# Altium schematic symbol library CW341_KintexUltraScaleTarget.SCHLIB: 30 symbols (part 2 of 2)
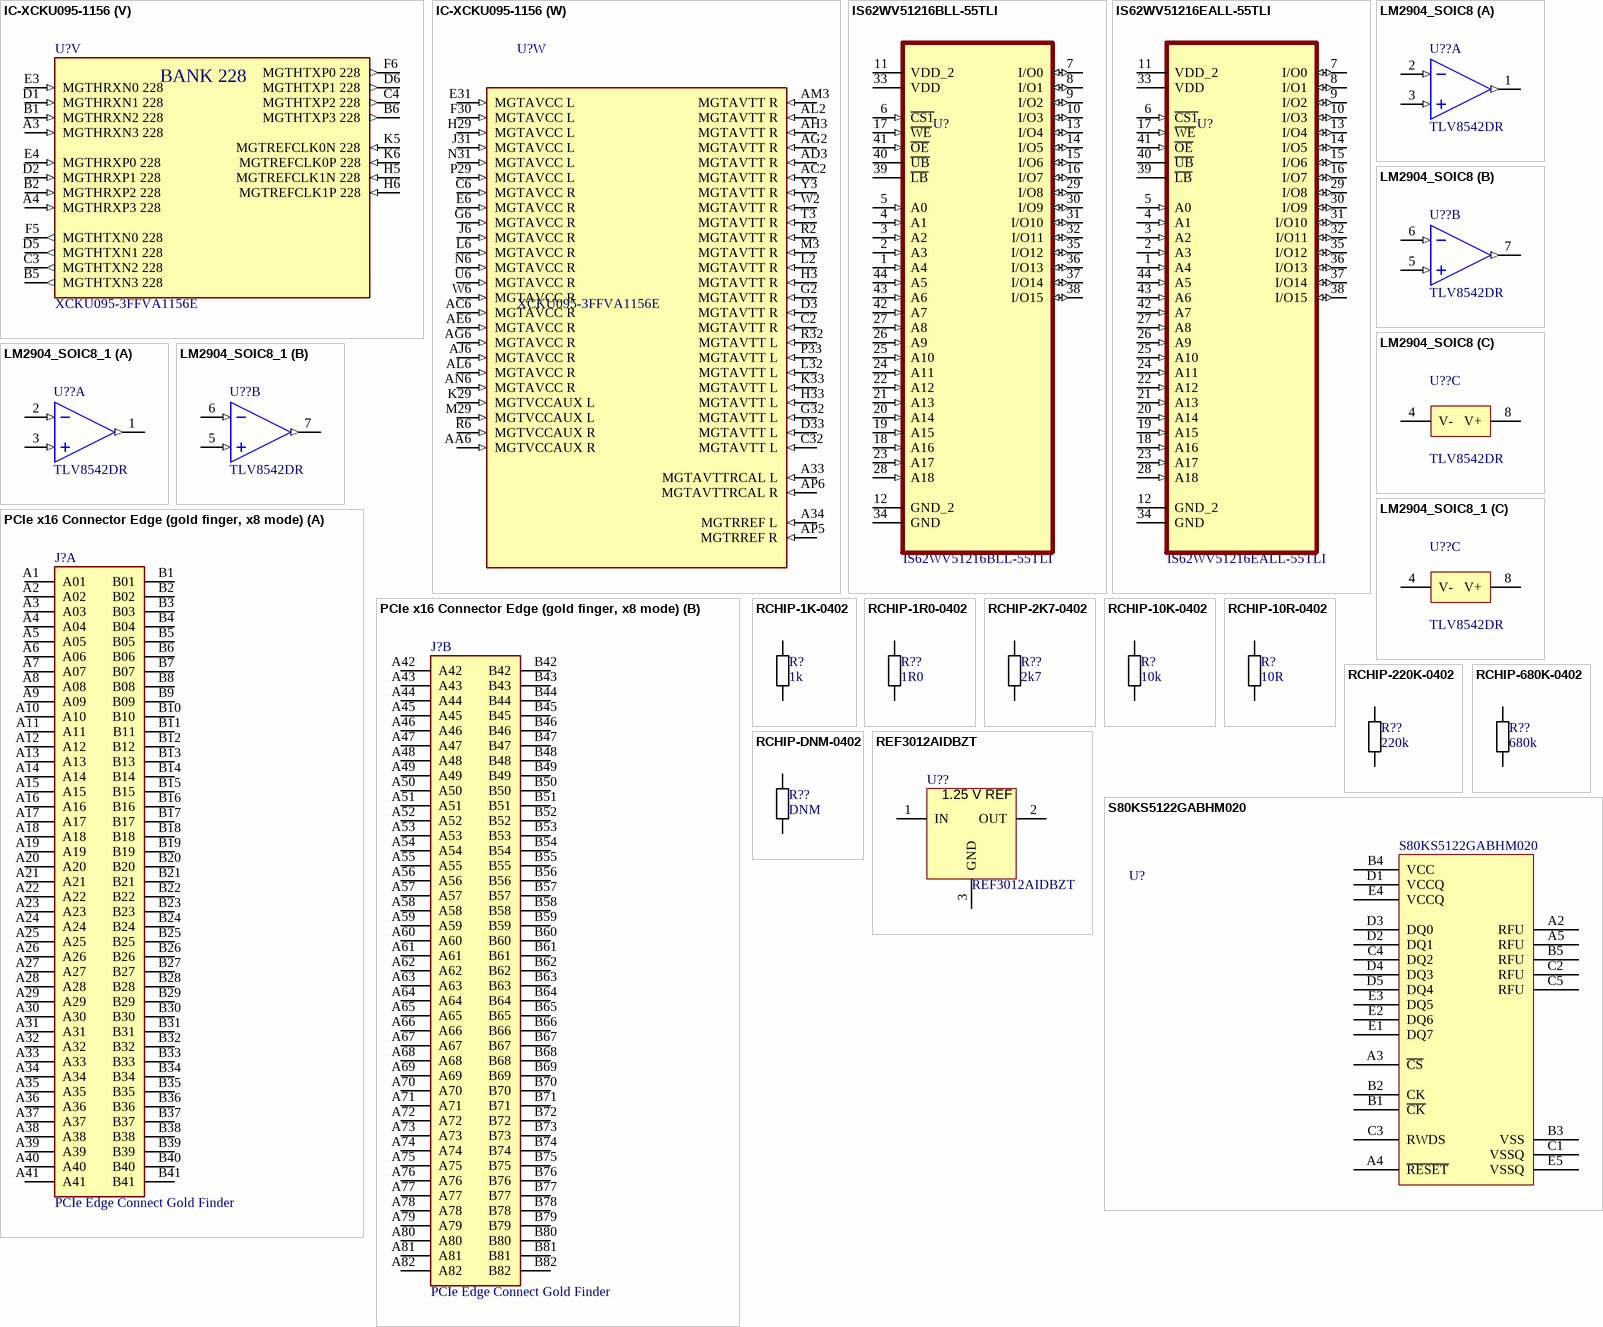
[diagram p13: symbols IC-XCKU095-1156 to S80KS5122GABHM020]

## IC-XCKU095-1156
designator U?, comment XCKU095-3FFVA1156E
IC FPGA 520 I/O 1156FCBGA; Manufacturer: Xilinx; Manufacturer Part Number: XCKU060-3FFVA1156E; Standoff Height: 0.4mm; Ram Size: 38MBytes; Min Supply Voltage: 0.97V; Max Junction Temp: +100°C; Max Supply Voltage: 1.8V; Number Of Logic Elements Cells: 1176000; Number Of I/Os: 520; Speed Grade: 3; Memory Type: RAM; Ipc Land Pattern Name: BGA1156N100P34X34_3500X3500X342; RoHS: TRUE; Height: 3.51mm; Footprint Url: https://www.xilinx.com/support/documentation/user_guides/ug575-ultrascale-pkg-pinout.pdf; Device Class L2: Embedded Processors and Controllers; ComponentLink2URL: https://www.xilinx.com/support/documentation/data_sheets/ds890-ultrascale-overview.pdf; Temperature Range High: +100°C; Device Class L1: Integrated Circuits (ICs); Package: 0; Octopart: https://octopart.com/xcku035-3ffva1156e-xilinx-67038192?r=sp; Automotive: No; ComponentLink2Description: Datasheet; Device Class L3: FPGAs - Field Programmable Gate Arrays; Category: IC; Lead Free: Yes; Temperature: 0°C to +100°C; Temperature Range Low: 0°C; Digikey Description: IC FPGA 520 I/O 1156FCBGA
footprint FP-XCKU060-3FFVA1156E-MFG
footprint FP-XCKU060-3FFVA1156E-IPC_C
footprint FP-XCKU060-3FFVA1156E-IPC_B
footprint FP-XCKU060-3FFVA1156E-IPC_A
part A pins: A1 GND (power), A2 GND (power), A5 GND (power), A6 GND (power), A7 GND (power), A11 GND (power), A21 GND (power), A30 GND (power), A31 GND (power), A32 GND (power), B3 GND (power), B4 GND (power), B7 GND (power), B8 GND (power), B18 GND (power), B28 GND (power), B30 GND (power), B33 GND (power), B34 GND (power), C1 GND (power), C5 GND (power), C7 GND (power), C15 GND (power), C25 GND (power), C30 GND (power), C31 GND (power), D4 GND (power), D7 GND (power), D12 GND (power), D22 GND (power), D30 GND (power), D34 GND (power), E1 GND (power), E2 GND (power), E5 GND (power), E7 GND (power), E9 GND (power), E19 GND (power), E29 GND (power), E30 GND (power), E32 GND (power), F3 GND (power), F4 GND (power), F7 GND (power), F16 GND (power), F26 GND (power), F28 GND (power), F29 GND (power), F33 GND (power), F34 GND (power), G1 GND (power), G5 GND (power), G7 GND (power), G13 GND (power), G23 GND (power), G28 GND (power), G31 GND (power), H4 GND (power), H7 GND (power), H10 GND (power), H20 GND (power), H28 GND (power), H30 GND (power), H34 GND (power), J1 GND (power), J2 GND (power), J5 GND (power), J7 GND (power), J17 GND (power), J27 GND (power), J28 GND (power), J32 GND (power), K3 GND (power), K4 GND (power), K14 GND (power), K24 GND (power), K28 GND (power), K30 GND (power), K34 GND (power), L1 GND (power), L5 GND (power), L11 GND (power), L21 GND (power), L28 GND (power), L31 GND (power), M4 GND (power), M8 GND (power), M10 GND (power), M12 GND (power), M14 GND (power), M16 GND (power), M18 GND (power), M28 GND (power), M30 GND (power), M33 GND (power), M34 GND (power), N1 GND (power), N2 GND (power), N5 GND (power), U11 GNDADC (power)
part B pins: AA1 GND (power), AA2 GND (power), AA5 GND (power), AA11 GND (power), AA13 GND (power), AA15 GND (power), AA17 GND (power), AA19 GND (power), AA21 GND (power), AA31 GND (power), AB3 GND (power), AB4 GND (power), AB8 GND (power), AB10 GND (power), AB12 GND (power), AB14 GND (power), AB16 GND (power), AB18 GND (power), AB28 GND (power), N9 GND (power), N11 GND (power), N13 GND (power), N15 GND (power), N17 GND (power), N19 GND (power), N25 GND (power), N28 GND (power), N32 GND (power), P3 GND (power), P4 GND (power), P8 GND (power), P10 GND (power), P12 GND (power), P14 GND (power), P16 GND (power), P18 GND (power), P22 GND (power), P28 GND (power), P30 GND (power), P34 GND (power), R1 GND (power), R5 GND (power), R9 GND (power), R11 GND (power), R13 GND (power), R15 GND (power), R17 GND (power), R19 GND (power), R28 GND (power), R31 GND (power), T4 GND (power), T8 GND (power), T10 GND (power), T12 GND (power), T14 GND (power), T16 GND (power), T18 GND (power), T20 GND (power), T26 GND (power), T28 GND (power), T29 GND (power), T30 GND (power), T33 GND (power), T34 GND (power), U1 GND (power), U2 GND (power), U5 GND (power), U13 GND (power), U15 GND (power), U17 GND (power), U19 GND (power), U23 GND (power), U30 GND (power), U31 GND (power), U32 GND (power), U33 GND (power), V3 GND (power), V4 GND (power), V10 GND (power), V14 GND (power), V16 GND (power), V18 GND (power), V20 GND (power), V30 GND (power), W1 GND (power), W5 GND (power), W13 GND (power), W15 GND (power), W17 GND (power), W19 GND (power), W27 GND (power), Y4 GND (power), Y8 GND (power), Y10 GND (power), Y14 GND (power), Y16 GND (power), Y18 GND (power), Y20 GND (power), Y24 GND (power), Y34 GND (power)
part C pins: AC1 GND (power), AC5 GND (power), AC11 GND (power), AC13 GND (power), AC15 GND (power), AC17 GND (power), AC19 GND (power), AC25 GND (power), AD4 GND (power), AD12 GND (power), AD22 GND (power), AD32 GND (power), AE1 GND (power), AE2 GND (power), AE5 GND (power), AE7 GND (power), AE9 GND (power), AE19 GND (power), AE29 GND (power), AF3 GND (power), AF4 GND (power), AF7 GND (power), AF16 GND (power), AF26 GND (power), AG1 GND (power), AG5 GND (power), AG7 GND (power), AG13 GND (power), AG23 GND (power), AG33 GND (power), AH4 GND (power), AH7 GND (power), AH10 GND (power), AH20 GND (power), AH30 GND (power), AJ1 GND (power), AJ2 GND (power), AJ5 GND (power), AJ7 GND (power), AJ17 GND (power), AJ27 GND (power), AK3 GND (power), AK4 GND (power), AK7 GND (power), AK14 GND (power), AK24 GND (power), AK34 GND (power), AL1 GND (power), AL5 GND (power), AL7 GND (power), AL11 GND (power), AL21 GND (power), AL31 GND (power), AM4 GND (power), AM7 GND (power), AM8 GND (power), AM18 GND (power), AM28 GND (power), AN1 GND (power), AN2 GND (power), AN5 GND (power), AN7 GND (power), AN15 GND (power), AN25 GND (power), AP3 GND (power), AP4 GND (power), AP7 GND (power), AP12 GND (power), AP22 GND (power), AP32 GND (power), V8 GND (power)
part D pins: AA7 D02 0 (io), AA9 CCLK 0 (io), AB7 D01 DIN 0 (io), AC7 D00 MOSI 0 (io), AC9 TCK 0 (in), K7 M0 0 (in), L7 M1 0 (in), M7 M2 0 (in), N7 DONE 0 (io), P7 POR OVERRIDE (in), R7 PUDC B 0 (in), T7 PROGRAM B 0 (in), U7 RDWR FCS B 0 (io), U9 TDO 0 (out), V7 INIT B 0 (in), V9 TDI 0 (in), W7 CFGBVS 0 (in), W9 TMS 0 (in), Y7 D03 0 (io), Y11 DXN (power), Y12 DXP (power)
part E pins: AA8 VCCAUX (power), AA10 VCCINT (power), AA12 VCCINT (power), AA14 VCCINT (power), AA16 VCCINT (power), AA18 VCCBRAM (power), AB9 VCCO 0 (power), AB11 VCCINT (power), AB13 VCCINT (power), AB15 VCCINT (power), AB17 VCCBRAM (power), AB19 VCCAUX IO (power), AC8 VCCAUX (power), AC10 VCCINT (power), AC12 VCCINT (power), AC14 VCCINT (power), AC16 VCCINT (power), AC18 VCCAUX IO (power), AD7 VBATT (power), M9 VCCINT (power), M11 VCCINT (power), M13 VCCINT (power), M15 VCCINT (power), M17 VCCINT IO (power), M19 VCCAUX IO (power), N8 VCCINT (power), N10 VCCINT (power), N12 VCCINT (power), N14 VCCINT (power), N16 VCCINT (power), N18 VCCAUX IO (power), P9 VCCINT (power), P11 VCCINT (power), P13 VCCINT (power), P15 VCCINT (power), P17 VCCINT IO (power), P19 VCCAUX IO (power), R8 VCCINT (power), R10 VCCINT (power), R12 VCCINT (power), R14 VCCINT (power), R16 VCCINT (power), R18 VCCINT IO (power), R20 VCCAUX IO (power), T9 VCCINT (power), T11 VCCINT (power), T13 VCCINT (power), T15 VCCINT (power), T17 VCCINT (power), T19 VCCAUX IO (power), U8 VCCAUX (power), U10 VCCINT (power), U12 VCCADC (power), U14 VCCINT (power), U16 VCCINT (power), U18 VCCINT IO (power), U20 VCCAUX IO (power), V11 VREFN (power), V12 VP (power), V13 VCCINT (power), V15 VCCINT (power), V17 VCCBRAM (power), V19 VCCAUX IO (power), W8 VCCAUX (power), W10 VCCINT (power), W11 VN (power), W12 VREFP (power), W14 VCCINT (power), W16 VCCINT (power), W18 VCCINT IO (power), W20 VCCAUX IO (power), Y9 VCCO 0 (power), Y13 VCCINT (power), Y15 VCCINT (power), Y17 VCCBRAM (power), Y19 VCCAUX IO (power)
part F pins: AD20 IO L3P T0L N4 AD15P 45 (io), AD21 IO L1P T0L N0 DBC 45 (io), AD23 VREF 45 (io), AD24 IO T0U N12 VRP 45 (io), AE20 IO L3N T0L N5 AD15N 45 (io), AE21 IO L1N T0L N1 DBC 45 (io), AE22 IO L5P T0U N8 AD14P 45 (io), AE23 IO L5N T0U N9 AD14N 45 (io), AE24 VCCO 45 (power), AE25 IO L7P T1L N0 QBC AD13P 45 (io), AE26 IO L7N T1L N1 QBC AD13N 45 (io), AF20 IO L2P T0L N2 45 (io), AF21 VCCO 45 (power), AF22 IO L6P T0U N10 AD6P 45 (io), AF23 IO L8P T1L N2 AD5P 45 (io), AF24 IO L8N T1L N3 AD5N 45 (io), AF25 IO T1U N12 45 (io), AG20 IO L2N T0L N3 45 (io), AG21 IO L4P T0U N6 DBC AD7P 45 (io), AG22 IO L6N T0U N11 AD6N 45 (io), AG24 IO L9P T1L N4 AD12P 45 (io), AG25 IO L9N T1L N5 AD12N 45 (io), AH21 IO L4N T0U N7 DBC AD7N 45 (io), AH22 IO L12P T1U N10 GC 45 (io), AH23 IO L12N T1U N11 GC 45 (io), AH24 IO L10P T1U N6 QBC AD4P 45 (io), AH25 VCCO 45 (power), AJ20 IO L16P T2U N6 QBC AD3P 45 (io), AJ21 IO L13P T2L N0 GC QBC 45 (io), AJ22 VCCO 45 (power), AJ23 IO L11P T1U N8 GC 45 (io), AJ24 IO L11N T1U N9 GC 45 (io), AJ25 IO L10N T1U N7 QBC AD4N 45 (io), AK20 IO L16N T2U N7 QBC AD3N 45 (io), AK21 IO L13N T2L N1 GC QBC 45 (io), AK22 IO L14P T2L N2 GC 45 (io), AK23 IO L14N T2L N3 GC 45 (io), AK25 IO T2U N12 45 (io), AL20 IO L15P T2L N4 AD11P 45 (io), AL22 IO L17P T2U N8 AD10P 45 (io), AL23 IO L17N T2U N9 AD10N 45 (io), AL24 IO L18P T2U N10 AD2P 45 (io), AL25 IO L18N T2U N11 AD2N 45 (io), AM20 IO L15N T2L N5 AD11N 45 (io), AM21 IO L19P T3L N0 DBC AD9P 45 (io), AM22 IO L20P T3L N2 AD1P 45 (io), AM23 VCCO 45 (power), AM24 IO L21P T3L N4 AD8P 45 (io), AM25 IO T3U N12 45 (io), AN20 VCCO 45 (power), AN21 IO L19N T3L N1 DBC AD9N 45 (io), AN22 IO L20N T3L N3 AD1N 45 (io), AN23 IO L24P T3U N10 45 (io), AN24 IO L21N T3L N5 AD8N 45 (io), AP20 IO L22P T3U N6 DBC AD0P 45 (io), AP21 IO L22N T3U N7 DBC AD0N 45 (io), AP23 IO L24N T3U N11 45 (io), AP24 IO L23P T3U N8 45 (io), AP25 IO L23N T3U N9 45 (io)
part G pins: AD14 IO T3U N12 44 (io), AD15 IO L24N T3U N11 44 (io), AD16 IO L24P T3U N10 44 (io), AD17 VCCO 44 (power), AD18 IO L19N T3L N1 DBC AD9N 44 (io), AD19 IO L19P T3L N0 DBC AD9P 44 (io), AE14 VCCO 44 (power), AE15 IO L22N T3U N7 DBC AD0N 44 (io), AE16 IO L22P T3U N6 DBC AD0P 44 (io), AE17 IO L23P T3U N8 44 (io), AE18 IO L21P T3L N4 AD8P 44 (io), AF14 IO L20N T3L N3 AD1N 44 (io), AF15 IO L20P T3L N2 AD1P 44 (io), AF17 IO L23N T3U N9 44 (io), AF18 IO L21N T3L N5 AD8N 44 (io), AF19 VREF 45 (io), AG14 IO L18N T2U N11 AD2N 44 (io), AG15 IO L18P T2U N10 AD2P 44 (io), AG16 IO L15N T2L N5 AD11N 44 (io), AG17 IO L15P T2L N4 AD11P 44 (io), AG18 VCCO 44 (power), AG19 IO L17P T2U N8 AD10P 44 (io), AH14 IO T2U N12 44 (io), AH15 VCCO 44 (power), AH16 IO L14P T2L N2 GC 44 (io), AH17 IO L13N T2L N1 GC QBC 44 (io), AH18 IO L13P T2L N0 GC QBC 44 (io), AH19 IO L17N T2U N9 AD10N 44 (io), AJ14 IO L16N T2U N7 QBC AD3N 44 (io), AJ15 IO L16P T2U N6 QBC AD3P 44 (io), AJ16 IO L14N T2L N3 GC 44 (io), AJ18 IO L11P T1U N8 GC 44 (io), AJ19 IO T1U N12 44 (io), AK15 IO L9P T1L N4 AD12P 44 (io), AK16 IO L12N T1U N11 GC 44 (io), AK17 IO L12P T1U N10 GC 44 (io), AK18 IO L11N T1U N9 GC 44 (io), AK19 VCCO 44 (power), AL14 IO L7P T1L N0 QBC AD13P 44 (io), AL15 IO L9N T1L N5 AD12N 44 (io), AL16 VCCO 44 (power), AL17 IO L10N T1U N7 QBC AD4N 44 (io), AL18 IO L10P T1U N6 QBC AD4P 44 (io), AL19 IO L8P T1L N2 AD5P 44 (io), AM14 IO L7N T1L N1 QBC AD13N 44 (io), AM15 IO L5N T0U N9 AD14N 44 (io), AM16 IO L5P T0U N8 AD14P 44 (io), AM17 IO L3P T0L N4 AD15P 44 (io), AM19 IO L8N T1L N3 AD5N 44 (io), AN14 IO L1P T0L N0 DBC 44 (io), AN16 IO L3N T0L N5 AD15N 44 (io), AN17 IO L4N T0U N7 DBC AD7N 44 (io), AN18 IO L4P T0U N6 DBC AD7P 44 (io), AN19 IO L2P T0L N2 44 (io), AP14 IO L1N T0L N1 DBC 44 (io), AP15 IO L6N T0U N11 AD6N 44 (io), AP16 IO L6P T0U N10 AD6P 44 (io), AP17 VCCO 44 (power), AP18 IO L2N T0L N3 44 (io), AP19 IO T0U N12 VRP 44 (io)
part H pins: AG26 IO T0U N12 VRP 46 (io), AG27 VREF 46 (io), AG28 VCCO 46 (power), AH26 IO L1P T0L N0 DBC 46 (io), AH27 IO L5P T0U N8 AD14P 46 (io), AH28 IO L5N T0U N9 AD14N 46 (io), AH29 IO T2U N12 46 (io), AH31 IO L17P T2U N8 AD10P 46 (io), AH32 IO L17N T2U N9 AD10N 46 (io), AH33 IO L16P T2U N6 QBC AD3P 46 (io), AH34 IO L18P T2U N10 AD2P 46 (io), AJ26 IO L1N T0L N1 DBC 46 (io), AJ28 IO L6P T0U N10 AD6P 46 (io), AJ29 IO L13P T2L N0 GC QBC 46 (io), AJ30 IO L15P T2L N4 AD11P 46 (io), AJ31 IO L15N T2L N5 AD11N 46 (io), AJ32 VCCO 46 (power), AJ33 IO L16N T2U N7 QBC AD3N 46 (io), AJ34 IO L18N T2U N11 AD2N 46 (io), AK26 IO L3P T0L N4 AD15P 46 (io), AK27 IO L3N T0L N5 AD15N 46 (io), AK28 IO L6N T0U N11 AD6N 46 (io), AK29 VCCO 46 (power), AK30 IO L13N T2L N1 GC QBC 46 (io), AK31 IO L14P T2L N2 GC 46 (io), AK32 IO L14N T2L N3 GC 46 (io), AK33 IO T3U N12 46 (io), AL26 VCCO 46 (power), AL27 IO L4P T0U N6 DBC AD7P 46 (io), AL28 IO L4N T0U N7 DBC AD7N 46 (io), AL29 IO L11P T1U N8 GC 46 (io), AL30 IO L12P T1U N10 GC 46 (io), AL32 IO L19P T3L N0 DBC AD9P 46 (io), AL33 IO L19N T3L N1 DBC AD9N 46 (io), AL34 IO L24P T3U N10 46 (io), AM26 IO L2P T0L N2 46 (io), AM27 IO L2N T0L N3 46 (io), AM29 IO L11N T1U N9 GC 46 (io), AM30 IO L12N T1U N11 GC 46 (io), AM31 IO T1U N12 46 (io), AM32 IO L23P T3U N8 46 (io), AM33 VCCO 46 (power), AM34 IO L24N T3U N11 46 (io), AN26 IO L7P T1L N0 QBC AD13P 46 (io), AN27 IO L9P T1L N4 AD12P 46 (io), AN28 IO L9N T1L N5 AD12N 46 (io), AN29 IO L10P T1U N6 QBC AD4P 46 (io), AN30 VCCO 46 (power), AN31 IO L21P T3L N4 AD8P 46 (io), AN32 IO L23N T3U N9 46 (io), AN33 IO L20P T3L N2 AD1P 46 (io), AN34 IO L22P T3U N6 DBC AD0P 46 (io), AP26 IO L7N T1L N1 QBC AD13N 46 (io), AP27 VCCO 46 (power), AP28 IO L8P T1L N2 AD5P 46 (io), AP29 IO L8N T1L N3 AD5N 46 (io), AP30 IO L10N T1U N7 QBC AD4N 46 (io), AP31 IO L21N T3L N5 AD8N 46 (io), AP33 IO L20N T3L N3 AD1N 46 (io), AP34 IO L22N T3U N7 DBC AD0N 46 (io)
part I pins: AA20 IO L9P T1L N4 AD12P 47 (io), AA22 IO L7P T1L N0 QBC AD13P 47 (io), AA23 IO L11N T1U N9 GC 47 (io), AA24 IO L12P T1U N10 GC 47 (io), AA25 IO L12N T1U N11 GC 47 (io), AA26 VCCO 47 (power), AA27 IO L5P T0U N8 AD14P 47 (io), AA28 IO T0U N12 VRP 47 (io), AB20 IO L9N T1L N5 AD12N 47 (io), AB21 IO L10P T1U N6 QBC AD4P 47 (io), AB22 IO L7N T1L N1 QBC AD13N 47 (io), AB23 VCCO 47 (power), AB24 IO L3P T0L N4 AD15P 47 (io), AB25 IO L6P T0U N10 AD6P 47 (io), AB26 IO L6N T0U N11 AD6N 47 (io), AB27 IO L5N T0U N9 AD14N 47 (io), AC20 VCCO 47 (power), AC21 IO L10N T1U N7 QBC AD4N 47 (io), AC22 IO L8P T1L N2 AD5P 47 (io), AC23 IO L8N T1L N3 AD5N 47 (io), AC24 IO L3N T0L N5 AD15N 47 (io), AC26 IO L4P T0U N6 DBC AD7P 47 (io), AC27 IO L4N T0U N7 DBC AD7N 47 (io), AD25 IO L2P T0L N2 47 (io), AD26 IO L2N T0L N3 47 (io), T21 VCCO 47 (power), T22 IO L17P T2U N8 AD10P 47 (io), T23 IO L17N T2U N9 AD10N 47 (io), U21 IO L15P T2L N4 AD11P 47 (io), U22 IO L15N T2L N5 AD11N 47 (io), U24 IO L20P T3L N2 AD1P 47 (io), U25 IO L20N T3L N3 AD1N 47 (io), U26 IO L22P T3U N6 DBC AD0P 47 (io), U27 IO L22N T3U N7 DBC AD0N 47 (io), U28 VCCO 47 (power), U29 IO T3U N12 47 (io), V21 IO L18P T2U N10 AD2P 47 (io), V22 IO L16P T2U N6 QBC AD3P 47 (io), V23 IO L16N T2U N7 QBC AD3N 47 (io), V24 VREF 47 (io), V25 VCCO 47 (power), V26 IO L24P T3U N10 47 (io), V27 IO L19P T3L N0 DBC AD9P 47 (io), V28 IO L19N T3L N1 DBC AD9N 47 (io), V29 IO L23P T3U N8 47 (io), W21 IO L18N T2U N11 AD2N 47 (io), W22 VCCO 47 (power), W23 IO L13P T2L N0 GC QBC 47 (io), W24 IO L13N T2L N1 GC QBC 47 (io), W25 IO L14P T2L N2 GC 47 (io), W26 IO L24N T3U N11 47 (io), W28 IO L21P T3L N4 AD8P 47 (io), W29 IO L23N T3U N9 47 (io), Y21 IO T2U N12 47 (io), Y22 IO T1U N12 47 (io), Y23 IO L11P T1U N8 GC 47 (io), Y25 IO L14N T2L N3 GC 47 (io), Y26 IO L1P T0L N0 DBC 47 (io), Y27 IO L1N T0L N1 DBC 47 (io), Y28 IO L21N T3L N5 AD8N 47 (io)
part J pins: AA29 IO L16P T2U N6 QBC AD3P 48 (io), AA30 VREF 48 (io), AA32 IO L13P T2L N0 GC QBC 48 (io), AA33 IO T2U N12 48 (io), AA34 IO L17P T2U N8 AD10P 48 (io), AB29 IO L16N T2U N7 QBC AD3N 48 (io), AB30 IO L14P T2L N2 GC 48 (io), AB31 IO L14N T2L N3 GC 48 (io), AB32 IO L13N T2L N1 GC QBC 48 (io), AB33 VCCO 48 (power), AB34 IO L17N T2U N9 AD10N 48 (io), AC28 IO L3P T0L N4 AD15P 48 (io), AC29 IO T0U N12 VRP 48 (io), AC30 VCCO 48 (power), AC31 IO L12P T1U N10 GC 48 (io), AC32 IO L12N T1U N11 GC 48 (io), AC33 IO L18P T2U N10 AD2P 48 (io), AC34 IO L15P T2L N4 AD11P 48 (io), AD27 VCCO 48 (power), AD28 IO L3N T0L N5 AD15N 48 (io), AD29 IO L5P T0U N8 AD14P 48 (io), AD30 IO L11P T1U N8 GC 48 (io), AD31 IO L11N T1U N9 GC 48 (io), AD33 IO L18N T2U N11 AD2N 48 (io), AD34 IO L15N T2L N5 AD11N 48 (io), AE27 IO L1P T0L N0 DBC 48 (io), AE28 IO L2P T0L N2 48 (io), AE30 IO L5N T0U N9 AD14N 48 (io), AE31 IO T1U N12 48 (io), AE32 IO L9P T1L N4 AD12P 48 (io), AE33 IO L10P T1U N6 QBC AD4P 48 (io), AE34 VCCO 48 (power), AF27 IO L1N T0L N1 DBC 48 (io), AF28 IO L2N T0L N3 48 (io), AF29 IO L4P T0U N6 DBC AD7P 48 (io), AF30 IO L6P T0U N10 AD6P 48 (io), AF31 VCCO 48 (power), AF32 IO L9N T1L N5 AD12N 48 (io), AF33 IO L8P T1L N2 AD5P 48 (io), AF34 IO L10N T1U N7 QBC AD4N 48 (io), AG29 IO L4N T0U N7 DBC AD7N 48 (io), AG30 IO L6N T0U N11 AD6N 48 (io), AG31 IO L7P T1L N0 QBC AD13P 48 (io), AG32 IO L7N T1L N1 QBC AD13N 48 (io), AG34 IO L8N T1L N3 AD5N 48 (io), U34 IO L23P T3U N8 48 (io), V31 IO L24P T3U N10 48 (io), V32 IO T3U N12 48 (io), V33 IO L21P T3L N4 AD8P 48 (io), V34 IO L23N T3U N9 48 (io), W30 IO L20P T3L N2 AD1P 48 (io), W31 IO L24N T3U N11 48 (io), W32 VCCO 48 (power), W33 IO L19P T3L N0 DBC AD9P 48 (io), W34 IO L21N T3L N5 AD8N 48 (io), Y29 VCCO 48 (power), Y30 IO L20N T3L N3 AD1N 48 (io), Y31 IO L22P T3U N6 DBC AD0P 48 (io), Y32 IO L22N T3U N7 DBC AD0N 48 (io), Y33 IO L19N T3L N1 DBC AD9N 48 (io)
part K pins: A8 IO T0U N12 VRP 66 (io), A9 IO L2N T0L N3 66 (io), A10 IO L4N T0U N7 DBC AD7N 66 (io), A12 IO L23N T3U N9 66 (io), A13 IO L23P T3U N8 66 (io), B9 IO L2P T0L N2 66 (io), B10 IO L4P T0U N6 DBC AD7P 66 (io), B11 IO L21N T3L N5 AD8N 66 (io), B12 IO L20N T3L N3 AD1N 66 (io), B13 VCCO 66 (power), C8 IO L3N T0L N5 AD15N 66 (io), C9 IO L5N T0U N9 AD14N 66 (io), C10 VCCO 66 (power), C11 IO L21P T3L N4 AD8P 66 (io), C12 IO L20P T3L N2 AD1P 66 (io), C13 IO L24N T3U N11 66 (io), D8 IO L3P T0L N4 AD15P 66 (io), D9 IO L5P T0U N8 AD14P 66 (io), D10 IO L6N T0U N11 AD6N 66 (io), D11 IO L19N T3L N1 DBC AD9N 66 (io), D13 IO L24P T3U N10 66 (io), E8 IO L1N T0L N1 DBC 66 (io), E10 IO L6P T0U N10 AD6P 66 (io), E11 IO L19P T3L N0 DBC AD9P 66 (io), E12 IO T3U N12 66 (io), E13 IO L22N T3U N7 DBC AD0N 66 (io), F8 IO L1P T0L N0 DBC 66 (io), F9 IO L11N T1U N9 GC 66 (io), F10 IO L12N T1U N11 GC 66 (io), F11 VCCO 66 (power), F12 IO T2U N12 66 (io), F13 IO L22P T3U N6 DBC AD0P 66 (io), G8 VCCO 66 (power), G9 IO L11P T1U N8 GC 66 (io), G10 IO L12P T1U N10 GC 66 (io), G11 IO L13N T2L N1 GC QBC 66 (io), G12 IO L14N T2L N3 GC 66 (io), H8 IO L9N T1L N5 AD12N 66 (io), H9 IO L8N T1L N3 AD5N 66 (io), H11 IO L13P T2L N0 GC QBC 66 (io), H12 IO L14P T2L N2 GC 66 (io), H13 IO L18N T2U N11 AD2N 66 (io), J8 IO L9P T1L N4 AD12P 66 (io), J9 IO L8P T1L N2 AD5P 66 (io), J10 IO L10N T1U N7 QBC AD4N 66 (io), J11 IO L15N T2L N5 AD11N 66 (io), J12 VCCO 66 (power), J13 IO L18P T2U N10 AD2P 66 (io), K8 IO L7N T1L N1 QBC AD13N 66 (io), K9 VCCO 66 (power), K10 IO L10P T1U N6 QBC AD4P 66 (io), K11 IO L15P T2L N4 AD11P 66 (io), K12 IO L17N T2U N9 AD10N 66 (io), K13 IO L16N T2U N7 QBC AD3N 66 (io), L8 IO L7P T1L N0 QBC AD13P 66 (io), L9 IO T1U N12 66 (io), L10 VREF 66 (io), L12 IO L17P T2U N8 AD10P 66 (io), L13 IO L16P T2U N6 QBC AD3P 66 (io)
part L pins: A20 IO L17N T2U N9 AD10N 68 (io), A22 IO T2U N12 68 (io), A23 IO T1U N12 68 (io), A24 IO L10N T1U N7 QBC AD4N 68 (io), A25 IO L8N T1L N3 AD5N 68 (io), A26 VCCO 68 (power), A27 IO L6P T0U N10 AD6P 68 (io), A28 IO L6N T0U N11 AD6N 68 (io), A29 IO L4N T0U N7 DBC AD7N 68 (io), B20 IO L17P T2U N8 AD10P 68 (io), B21 IO L15P T2L N4 AD11P 68 (io), B22 IO L15N T2L N5 AD11N 68 (io), B23 VCCO 68 (power), B24 IO L10P T1U N6 QBC AD4P 68 (io), B25 IO L8P T1L N2 AD5P 68 (io), B26 IO L9N T1L N5 AD12N 68 (io), B27 IO L2N T0L N3 68 (io), B29 IO L4P T0U N6 DBC AD7P 68 (io), C20 VCCO 68 (power), C21 IO L16P T2U N6 QBC AD3P 68 (io), C22 IO L16N T2U N7 QBC AD3N 68 (io), C23 IO L13N T2L N1 GC QBC 68 (io), C24 IO L12N T1U N11 GC 68 (io), C26 IO L9P T1L N4 AD12P 68 (io), C27 IO L2P T0L N2 67 (io), C28 IO L5N T0U N9 AD14N 68 (io), C29 IO T0U N12 VRP 68 (io), D20 IO L18P T2U N10 AD2P 68 (io), D21 IO L18N T2U N11 AD2N 68 (io), D23 IO L13P T2L N0 GC QBC 68 (io), D24 IO L12P T1U N10 GC 68 (io), D25 IO L11N T1U N9 GC 68 (io), D26 IO L7N T1L N1 QBC AD13N 68 (io), D27 VCCO 68 (power), D28 IO L5P T0U N8 AD14P 67 (io), D29 IO L3N T0L N5 AD15N 68 (io), E20 IO L20P T3L N2 AD1P 68 (io), E21 IO L20N T3L N3 AD1N 68 (io), E22 IO L14P T2L N2 GC 68 (io), E23 IO L14N T2L N3 GC 68 (io), E24 VCCO 68 (power), E25 IO L11P T1U N8 GC 68 (io), E26 IO L7P T1L N0 QBC AD13P 68 (io), E27 IO L1N T0L N1 DBC 68 (io), E28 IO L3P T0L N4 AD15P 68 (io), F20 IO L22N T3U N7 DBC AD0N 68 (io), F21 VCCO 68 (power), F22 IO L23N T3U N9 68 (io), F23 IO L21P T3L N4 AD8P 68 (io), F24 IO L21N T3L N5 AD8N 68 (io), F25 IO L19N T3L N1 DBC AD9N 68 (io), F27 IO L1P T0L N0 DBC 68 (io), G20 IO L22P T3U N6 DBC AD0P 68 (io), G21 IO L24N T3U N11 68 (io), G22 IO L23P T3U N8 68 (io), G24 IO L19P T3L N0 DBC AD9P 68 (io), H21 IO L24P T3U N10 68 (io), H22 IO T3U N12 68 (io), J20 VREF 68 (io)
part M pins: A14 IO L1N T0L N1 DBC 67 (io), A15 IO L3N T0L N5 AD15N 67 (io), A16 VCCO 67 (power), A17 IO T0U N12 VRP 67 (io), A18 IO L2N T0L N3 67 (io), A19 IO L2P T0L N2 67 (io), B14 IO L1P T0L N0 DBC 67 (io), B15 IO L3P T0L N4 AD15P 67 (io), B16 IO L5N T0U N9 AD14N 67 (io), B17 IO L5P T0U N8 AD14P 67 (io), B19 IO L4N T0U N7 DBC AD7N 67 (io), C14 IO L7N T1L N1 QBC AD13N 67 (io), C16 IO T1U N12 67 (io), C17 IO L6N T0U N11 AD6N 67 (io), C18 IO L6P T0U N10 AD6P 67 (io), C19 IO L4P T0U N6 DBC AD7P 67 (io), D14 IO L7P T1L N0 QBC AD13P 67 (io), D15 IO L8N T1L N3 AD5N 67 (io), D16 IO L11N T1U N9 GC 67 (io), D17 VCCO 67 (power), D18 IO L10N T1U N7 QBC AD4N 67 (io), D19 IO L10P T1U N6 QBC AD4P 67 (io), E14 VCCO 67 (power), E15 IO L8P T1L N2 AD5P 67 (io), E16 IO L11P T1U N8 GC 67 (io), E17 IO L12N T1U N11 GC 67 (io), E18 IO L12P T1U N10 GC 67 (io), F14 IO L9N T1L N5 AD12N 67 (io), F15 IO L9P T1L N4 AD12P 67 (io), F17 IO L14N T2L N3 GC 67 (io), F18 IO L14P T2L N2 GC 67 (io), F19 IO L16N T2U N7 QBC AD3N 67 (io), G14 IO L15N T2L N5 AD11N 67 (io), G15 IO L15P T2L N4 AD11P 67 (io), G16 IO L13N T2L N1 GC QBC 67 (io), G17 IO L13P T2L N0 GC QBC 67 (io), G18 VCCO 67 (power), G19 IO L16P T2U N6 QBC AD3P 67 (io), H14 IO T2U N12 67 (io), H15 VCCO 67 (power), H16 IO L17N T2U N9 AD10N 67 (io), H17 IO L17P T2U N8 AD10P 67 (io), H18 IO L18N T2U N11 AD2N 67 (io), H19 IO L18P T2U N10 AD2P 67 (io), J14 IO L19N T3L N1 DBC AD9N 67 (io), J15 IO L19P T3L N0 DBC AD9P 67 (io), J16 IO L23N T3U N9 67 (io), J18 IO L22N T3U N7 DBC AD0N 67 (io), J19 IO L22P T3U N6 DBC AD0P 67 (io), K15 IO L21N T3L N5 AD8N 67 (io), K16 IO L23P T3U N8 67 (io), K17 IO L20N T3L N3 AD1N 67 (io), K18 IO L20P T3L N2 AD1P 67 (io), K19 VCCO 67 (power), L14 VREF 68 (io), L15 IO L21P T3L N4 AD8P 67 (io), L16 VCCO 67 (power), L17 IO T3U N12 67 (io), L18 IO L24N T3U N11 67 (io), L19 IO L24P T3U N10 67 (io)
part N pins: AD8 IO L17N T2U N9 AD10N 64 (io), AD9 IO L17P T2U N8 AD10P 64 (io), AD10 IO L16P T2U N6 QBC AD3P 64 (io), AD11 IO L10P T1U N6 QBC AD4P 64 (io), AD13 VREF 64 (io), AE8 IO L15P T2L N4 AD11P 64 (io), AE10 IO L16N T2U N7 QBC AD3N 64 (io), AE11 IO L10N T1U N7 QBC AD4N 64 (io), AE12 IO L9P T1L N4 AD12P 64 (io), AE13 IO L7P T1L N0 QBC AD13P 64 (io), AF8 IO L15N T2L N5 AD11N 64 (io), AF9 IO L14P T2L N2 GC 64 (io), AF10 IO L13P T2L N0 GC QBC 64 (io), AF11 VCCO 64 (power), AF12 IO L9N T1L N5 AD12N 64 (io), AF13 IO L7N T1L N1 QBC AD13N 64 (io), AG8 VCCO 64 (power), AG9 IO L14N T2L N3 GC 64 (io), AG10 IO L13N T2L N1 GC QBC 64 (io), AG11 IO L12P T1U N10 GC 64 (io), AG12 IO L11P T1U N8 GC 64 (io), AH8 IO L18N T2U N11 AD2N 64 (io), AH9 IO L18P T2U N10 AD2P 64 (io), AH11 IO L12N T1U N11 GC 64 (io), AH12 IO L11N T1U N9 GC 64 (io), AH13 IO L8P T1L N2 AD5P 64 (io), AJ8 IO L23N T3U N9 64 (io), AJ9 IO L23P T3U N8 64 (io), AJ10 IO T2U N12 64 (io), AJ11 IO T1U N12 64 (io), AJ12 VCCO 64 (power), AJ13 IO L8N T1L N3 AD5N 64 (io), AK8 IO L24P T3U N10 64 (io), AK9 VCCO 64 (power), AK10 IO L21P T3L N4 AD8P 64 (io), AK11 IO T0U N12 64 (io), AK12 IO L5P T0U N8 AD14P 64 (io), AK13 IO L6P T0U N10 AD6P 64 (io), AL8 IO L24N T3U N11 64 (io), AL9 IO L21N T3L N5 AD8N 64 (io), AL10 IO L19P T3L N0 DBC AD9P 64 (io), AL12 IO L5N T0U N9 AD14N 64 (io), AL13 IO L6N T0U N11 AD6N 64 (io), AM9 IO T3U N12 64 (io), AM10 IO L19N T3L N1 DBC AD9N 64 (io), AM11 IO L3P T0L N4 AD15P 64 (io), AM12 IO L4P T0U N6 DBC AD7P 64 (io), AM13 VCCO 64 (power), AN8 IO L22P T3U N6 DBC AD0P 64 (io), AN9 IO L20P T3L N2 AD1P 64 (io), AN10 VCCO 64 (power), AN11 IO L3N T0L N5 AD15N 64 (io), AN12 IO L4N T0U N7 DBC AD7N 64 (io), AN13 IO L2P T0L N2 64 (io), AP8 IO L22N T3U N7 DBC AD0N 64 (io), AP9 IO L20N T3L N3 AD1N 64 (io), AP10 IO L1N T0L N1 DBC 64 (io), AP11 IO L1P T0L N0 DBC 64 (io), AP13 IO L2N T0L N3 64 (io)
part O pins: G25 IO L2P T0L N2 FOE B 65 (io), G26 IO L2N T0L N3 FWE FCS2 B 65 (io), G27 IO L1N T0L N1 DBC RS1 65 (io), H23 IO T0U N12 A28 65 (io), H24 IO L6N T0U N11 AD6N A21 65 (io), H25 VCCO 65 (power), H26 IO L5N T0U N9 AD14N A23 65 (io), H27 IO L1P T0L N0 DBC RS0 65 (io), J21 VREF 65 (io), J22 VCCO 65 (power), J23 IO L6P T0U N10 AD6P A20 65 (io), J24 IO L4P T0U N6 DBC AD7P A24 65 (io), J25 IO L4N T0U N7 DBC AD7N A25 65 (io), J26 IO L5P T0U N8 AD14P A22 65 (io), K20 IO L24P T3U N10 EMCCLK 65 (io), K21 IO L24N T3U N11 DOUT CSO B 65 (io), K22 IO T3U N12 PERSTN0 65 (io), K23 IO L10N T1U N7 QBC AD4N A13 D29 65 (io), K25 IO L9N T1L N5 AD12N A15 D31 65 (io), K26 IO L3P T0L N4 AD15P A26 65 (io), K27 IO L3N T0L N5 AD15N A27 65 (io), L20 IO L22N T3U N7 DBC AD0N D05 65 (io), L22 IO L10P T1U N6 QBC AD4P A12 D28 65 (io), L23 IO L8P T1L N2 AD5P A16 65 (io), L24 IO L8N T1L N3 AD5N A17 65 (io), L25 IO L9P T1L N4 AD12P A14 D30 65 (io), L26 VCCO 65 (power), L27 IO L7N T1L N1 QBC AD13N A19 65 (io), M20 IO L22P T3U N6 DBC AD0P D04 65 (io), M21 IO L23N T3U N9 I2C SDA 65 (io), M22 IO L19N T3L N1 DBC AD9N D11 65 (io), M23 VCCO 65 (power), M24 IO L12N T1U N11 GC A09 D25 65 (io), M25 IO L11P T1U N8 GC A10 D26 65 (io), M26 IO L11N T1U N9 GC A11 D27 65 (io), M27 IO L7P T1L N0 QBC AD13P A18 65 (io), N20 VCCO 65 (power), N21 IO L23P T3U N8 I2C SCLK 65 (io), N22 IO L19P T3L N0 DBC AD9P D10 65 (io), N23 IO T1U N12 PERSTN1 65 (io), N24 IO L12P T1U N10 GC A08 D24 65 (io), N26 IO L13N T2L N1 GC QBC A07 D23 65 (io), N27 IO T2U N12 CSI ADV B 65 (io), P20 IO L20P T3L N2 AD1P D08 65 (io), P21 IO L20N T3L N3 AD1N D09 65 (io), P23 IO L18N T2U N11 AD2N D13 65 (io), P24 IO L14P T2L N2 GC A04 D20 65 (io), P25 IO L14N T2L N3 GC A05 D21 65 (io), P26 IO L13P T2L N0 GC QBC A06 D22 65 (io), P27 VCCO 65 (power), R21 IO L21P T3L N4 AD8P D06 65 (io), R22 IO L21N T3L N5 AD8N D07 65 (io), R23 IO L18P T2U N10 AD2P D12 65 (io), R24 VCCO 65 (power), R25 IO L17P T2U N8 AD10P D14 65 (io), R26 IO L17N T2U N9 AD10N D15 65 (io), R27 IO L15N T2L N5 AD11N A03 D19 65 (io), T24 IO L16P T2U N6 QBC AD3P A00 D16 65 (io), T25 IO L16N T2U N7 QBC AD3N A01 D17 65 (io), T27 IO L15P T2L N4 AD11P A02 D18 65 (io)
part P pins: J33 MGTHRXP3 129 (in), J34 MGTHRXN3 129 (in), K31 MGTHTXP3 129 (out), K32 MGTHTXN3 129 (out), L33 MGTHRXP2 129 (in), L34 MGTHRXN2 129 (in), M31 MGTHTXP2 129 (out), M32 MGTHTXN2 129 (out), N29 MGTREFCLK1P 129 (in), N30 MGTREFCLK1N 129 (in), N33 MGTHRXP1 129 (in), N34 MGTHRXN1 129 (in), P31 MGTHTXP1 129 (out), P32 MGTHTXN1 129 (out), R29 MGTREFCLK0P 129 (in), R30 MGTREFCLK0N 129 (in), R33 MGTHRXP0 129 (in), R34 MGTHRXN0 129 (in), T31 MGTHTXP0 129 (out), T32 MGTHTXN0 129 (out)
part Q pins: B31 MGTHTXP3 130 (out), B32 MGTHTXN3 130 (out), C33 MGTHRXP3 130 (in), C34 MGTHRXN3 130 (in), D31 MGTHTXP2 130 (out), D32 MGTHTXN2 130 (out), E33 MGTHRXP2 130 (in), E34 MGTHRXN2 130 (in), F31 MGTHRXP1 130 (in), F32 MGTHRXN1 130 (in), G29 MGTHTXP1 130 (out), G30 MGTHTXN1 130 (out), G33 MGTHRXP0 130 (in), G34 MGTHRXN0 130 (in), H31 MGTHTXP0 130 (out), H32 MGTHTXN0 130 (out), J29 MGTREFCLK1P 130 (in), J30 MGTREFCLK1N 130 (in), L29 MGTREFCLK0P 130 (in), L30 MGTREFCLK0N 130 (in)
part R pins: AD5 MGTREFCLK1N 224 (in), AD6 MGTREFCLK1P 224 (in), AF5 MGTREFCLK0N 224 (in), AF6 MGTREFCLK0P 224 (in), AJ3 MGTHRXN3 224 (in), AJ4 MGTHRXP3 224 (in), AK1 MGTHRXN2 224 (in), AK2 MGTHRXP2 224 (in), AK5 MGTHTXN3 224 (out), AK6 MGTHTXP3 224 (out), AL3 MGTHTXN2 224 (out), AL4 MGTHTXP2 224 (out), AM1 MGTHRXN1 224 (in), AM2 MGTHRXP1 224 (in), AM5 MGTHTXN1 224 (out), AM6 MGTHTXP1 224 (out), AN3 MGTHTXN0 224 (out), AN4 MGTHTXP0 224 (out), AP1 MGTHRXN0 224 (in), AP2 MGTHRXP0 224 (in)
part S pins: AB1 MGTHRXN3 225 (in), AB2 MGTHRXP3 225 (in), AB5 MGTREFCLK0N 225 (in), AB6 MGTREFCLK0P 225 (in), AC3 MGTHTXN3 225 (out), AC4 MGTHTXP3 225 (out), AD1 MGTHRXN2 225 (in), AD2 MGTHRXP2 225 (in), AE3 MGTHTXN2 225 (out), AE4 MGTHTXP2 225 (out), AF1 MGTHRXN1 225 (in), AF2 MGTHRXP1 225 (in), AG3 MGTHTXN1 225 (out), AG4 MGTHTXP1 225 (out), AH1 MGTHRXN0 225 (in), AH2 MGTHRXP0 225 (in), AH5 MGTHTXN0 225 (out), AH6 MGTHTXP0 225 (out), Y5 MGTREFCLK1N 225 (in), Y6 MGTREFCLK1P 225 (in)
part T pins: AA3 MGTHTXN0 226 (out), AA4 MGTHTXP0 226 (out), P1 MGTHRXN3 226 (in), P2 MGTHRXP3 226 (in), R3 MGTHTXN3 226 (out), R4 MGTHTXP3 226 (out), T1 MGTHRXN2 226 (in), T2 MGTHRXP2 226 (in), T5 MGTREFCLK1N 226 (in), T6 MGTREFCLK1P 226 (in), U3 MGTHTXN2 226 (out), U4 MGTHTXP2 226 (out), V1 MGTHRXN1 226 (in), V2 MGTHRXP1 226 (in), V5 MGTREFCLK0N 226 (in), V6 MGTREFCLK0P 226 (in), W3 MGTHTXN1 226 (out), W4 MGTHTXP1 226 (out), Y1 MGTHRXN0 226 (in), Y2 MGTHRXP0 226 (in)
part U pins: F1 MGTHRXN3 227 (in), F2 MGTHRXP3 227 (in), G3 MGTHTXN3 227 (out), G4 MGTHTXP3 227 (out), H1 MGTHRXN2 227 (in), H2 MGTHRXP2 227 (in), J3 MGTHTXN2 227 (out), J4 MGTHTXP2 227 (out), K1 MGTHRXN1 227 (in), K2 MGTHRXP1 227 (in), L3 MGTHTXN1 227 (out), L4 MGTHTXP1 227 (out), M1 MGTHRXN0 227 (in), M2 MGTHRXP0 227 (in), M5 MGTREFCLK1N 227 (in), M6 MGTREFCLK1P 227 (in), N3 MGTHTXN0 227 (out), N4 MGTHTXP0 227 (out), P5 MGTREFCLK0N 227 (in), P6 MGTREFCLK0P 227 (in)
part V pins: A3 MGTHRXN3 228 (in), A4 MGTHRXP3 228 (in), B1 MGTHRXN2 228 (in), B2 MGTHRXP2 228 (in), B5 MGTHTXN3 228 (out), B6 MGTHTXP3 228 (out), C3 MGTHTXN2 228 (out), C4 MGTHTXP2 228 (out), D1 MGTHRXN1 228 (in), D2 MGTHRXP1 228 (in), D5 MGTHTXN1 228 (out), D6 MGTHTXP1 228 (out), E3 MGTHRXN0 228 (in), E4 MGTHRXP0 228 (in), F5 MGTHTXN0 228 (out), F6 MGTHTXP0 228 (out), H5 MGTREFCLK1N 228 (in), H6 MGTREFCLK1P 228 (in), K5 MGTREFCLK0N 228 (in), K6 MGTREFCLK0P 228 (in)
part W pins: A33 MGTAVTTRCAL L (in), A34 MGTRREF L (in), AA6 MGTVCCAUX R (in), AC2 MGTAVTT R (in), AC6 MGTAVCC R (in), AD3 MGTAVTT R (in), AE6 MGTAVCC R (in), AG2 MGTAVTT R (in), AG6 MGTAVCC R (in), AH3 MGTAVTT R (in), AJ6 MGTAVCC R (in), AL2 MGTAVTT R (in), AL6 MGTAVCC R (in), AM3 MGTAVTT R (in), AN6 MGTAVCC R (in), AP5 MGTRREF R (in), AP6 MGTAVTTRCAL R (in), C2 MGTAVTT R (in), C6 MGTAVCC R (in), C32 MGTAVTT L (in), D3 MGTAVTT R (in), D33 MGTAVTT L (in), E6 MGTAVCC R (in), E31 MGTAVCC L (in), F30 MGTAVCC L (in), G2 MGTAVTT R (in), G6 MGTAVCC R (in), G32 MGTAVTT L (in), H3 MGTAVTT R (in), H29 MGTAVCC L (in), H33 MGTAVTT L (in), J6 MGTAVCC R (in), J31 MGTAVCC L (in), K29 MGTVCCAUX L (in), K33 MGTAVTT L (in), L2 MGTAVTT R (in), L6 MGTAVCC R (in), L32 MGTAVTT L (in), M3 MGTAVTT R (in), M29 MGTVCCAUX L (in), N6 MGTAVCC R (in), N31 MGTAVCC L (in), P29 MGTAVCC L (in), P33 MGTAVTT L (in), R2 MGTAVTT R (in), R6 MGTVCCAUX R (in), R32 MGTAVTT L (in), T3 MGTAVTT R (in), U6 MGTAVCC R (in), W2 MGTAVTT R (in), W6 MGTAVCC R (in), Y3 MGTAVTT R (in)
part D text: CONFIG
part F text: BANK 45
part G text: BANK 44
part H text: BANK 46
part I text: BANK 47
part J text: BANK 48
part K text: BANK 66
part L text: BANK 68
part M text: BANK 67
part N text: BANK 64
part O text: BANK 65
part P text: BANK 129
part Q text: BANK 130
part R text: BANK 224
part S text: BANK 225
part T text: BANK 226
part U text: BANK 227
part V text: BANK 228

## IS62WV51216BLL-55TLI
designator U?, comment Manufacturer Part Number: IS62WV51216BLL-55TLI  (hidden comment: SRAM - 8Mb (1M x 8) Parallel  55ns 44-TSOP II)
IC SRAM 8M PARALLEL 44TSOP II; Part Number: AS6C8008-55ZIN; Manufacture 1: Alliance Memory; Operating Supply Voltage: 3V; Address Bus Width: 20b; Max Supply Voltage: 5.5V; Min Supply Voltage: 2.7V; Memory Type: RAM,SRAM - Asynchronous,SDR; Max Supply Current: 60mA; Number of Ports: 1; Component Group: Digital IC; PP Material Stack: 0; Supplier 1: Digi-Key; RoHS: Yes; Category: RAM; Stock 1: 1798; Pricing 1: 1=6.76000, 10=6.21600, 25=6.08640, 50=6.06560, 135=5.44252, 270=5.27800, 540=5.01900, 1080=4.84400, 5130=4.35750 (USD); Mount: Surface Mount; Case/Package: TSOP; Number of Pins: 44; Min Operating Temperature: -40°C; Max Operating Temperature: 85°C; Package Quantity: 135; Interface: Parallel; Density: 8Mb; Access Time: 55ns; Packaging: Tray; Memory Size: 8Mb; Length: 18.42mm; Width: 10.16mm; Height: 1mm; Radiation Hardening: No; REACH SVHC: No SVHC; Lead Free: Lead Free; ComponentLink3URL: https://datasheet.ciiva.com/9274/as6c8008-9274921.pdf?src-supplier=Avnet; ComponentLink3Description: https://datasheet.ciiva.com/9274/as6c8008-9274921.pdf?src-supplier=Avnet; ComponentLink4URL: https://datasheet.ciiva.com/1510/32786-1510631.pdf?src-supplier=Element14; ComponentLink4Description: https://datasheet.ciiva.com/1510/32786-1510631.pdf?src-supplier=Element14; Supplier Part Number 1: 1450-1039-ND; .Checked SCH: *; .Checked PCB: *; Footprint: TSSOP-44; Manufacture Part Number 1: AS6C8008-55ZIN; Pin Count: 44; Mounting Technology: SMT; Component Kind: Standard; Component Type: Standard; PP Rotation: 0
footprint TSOP80P1180X120-44M (TSOP, 44-Leads, Body 18.42x10.16mm, Pitch 0.80mm, IPC Low Density)
pins: 1 A4 (in), 2 A3 (in), 3 A2 (in), 4 A1 (in), 5 A0 (in), 6 ~{CS1} (in), 7 I/O0 (io), 8 I/O1 (io), 9 I/O2 (io), 10 I/O3 (io), 11 VDD_2 (power), 12 GND_2, 13 I/O4 (io), 14 I/O5 (io), 15 I/O6 (io), 16 I/O7 (io), 17 ~{WE} (in), 18 A16 (in), 19 A15 (in), 20 A14 (in), 21 A13 (in), 22 A12 (in), 23 A17 (in), 24 A11 (in), 25 A10 (in), 26 A9 (in), 27 A8 (in), 28 A18 (in), 29 I/O8 (io), 30 I/O9 (io), 31 I/O10 (io), 32 I/O11 (io), 33 VDD (power), 34 GND, 35 I/O12 (io), 36 I/O13 (io), 37 I/O14 (io), 38 I/O15 (io), 39 ~{LB}, 40 ~{UB}, 41 ~{OE} (in), 42 A7 (in), 43 A6 (in), 44 A5 (in)

## IS62WV51216EALL-55TLI
designator U?, comment Manufacturer Part Number: IS62WV51216EALL-55TLI  (hidden comment: SRAM - 8Mb (1M x 8) Parallel  55ns 44-TSOP II)
IC SRAM 8M PARALLEL 44TSOP II; Manufacture 1: Alliance Memory; Operating Supply Voltage: 3V; Address Bus Width: 20b; Max Supply Voltage: 2.2V; Min Supply Voltage: 1.65V; Memory Type: RAM,SRAM - Asynchronous,SDR; Max Supply Current: 60mA; Number of Ports: 1; Component Group: Digital IC; PP Material Stack: 0; Supplier 1: Digi-Key; RoHS: Yes; Category: RAM; Stock 1: 1798; Pricing 1: 1=6.76000, 10=6.21600, 25=6.08640, 50=6.06560, 135=5.44252, 270=5.27800, 540=5.01900, 1080=4.84400, 5130=4.35750 (USD); Mount: Surface Mount; Case/Package: TSOP; Number of Pins: 44; Min Operating Temperature: -40°C; Max Operating Temperature: 85°C; Package Quantity: 135; Interface: Parallel; Density: 8Mb; Access Time: 55ns; Packaging: Tray; Memory Size: 8Mb; Length: 18.42mm; Width: 10.16mm; Height: 1mm; Radiation Hardening: No; REACH SVHC: No SVHC; Lead Free: Lead Free; ComponentLink3URL: https://datasheet.ciiva.com/9274/as6c8008-9274921.pdf?src-supplier=Avnet; ComponentLink3Description: https://datasheet.ciiva.com/9274/as6c8008-9274921.pdf?src-supplier=Avnet; ComponentLink4URL: https://datasheet.ciiva.com/1510/32786-1510631.pdf?src-supplier=Element14; ComponentLink4Description: https://datasheet.ciiva.com/1510/32786-1510631.pdf?src-supplier=Element14; Supplier Part Number 1: 1450-1039-ND; .Checked SCH: *; .Checked PCB: *; Part Number: IS62WV51216EALL-55TLI; Footprint: TSSOP-44; Manufacture Part Number 1: IS62WV51216EALL-55TLI; Pin Count: 44; Mounting Technology: SMT; Component Kind: Standard; Component Type: Standard; PP Rotation: 0
footprint TSOP80P1180X120-44M (TSOP, 44-Leads, Body 18.42x10.16mm, Pitch 0.80mm, IPC Low Density)
pins: 1 A4 (in), 2 A3 (in), 3 A2 (in), 4 A1 (in), 5 A0 (in), 6 ~{CS1} (in), 7 I/O0 (io), 8 I/O1 (io), 9 I/O2 (io), 10 I/O3 (io), 11 VDD_2 (power), 12 GND_2, 13 I/O4 (io), 14 I/O5 (io), 15 I/O6 (io), 16 I/O7 (io), 17 ~{WE} (in), 18 A16 (in), 19 A15 (in), 20 A14 (in), 21 A13 (in), 22 A12 (in), 23 A17 (in), 24 A11 (in), 25 A10 (in), 26 A9 (in), 27 A8 (in), 28 A18 (in), 29 I/O8 (io), 30 I/O9 (io), 31 I/O10 (io), 32 I/O11 (io), 33 VDD (power), 34 GND, 35 I/O12 (io), 36 I/O13 (io), 37 I/O14 (io), 38 I/O15 (io), 39 ~{LB}, 40 ~{UB}, 41 ~{OE} (in), 42 A7 (in), 43 A6 (in), 44 A5 (in)

## LM2904_SOIC8
designator U??, comment TLV8542DR
IC OP-AMP GP; Part Number: LM2904_SOIC8; Manufacture 1: Texas Instruments; Component Group: Analog IC; PP Material Stack: 0; Footprint: SOIC8; Manufacture Part Number 1: TLV8542DR; Pin Count: 8; Supplier 1: Digi-Key; Supplier Part Number 1: 296-48991-1-ND; Mounting Technology: SMT; RoHS: Yes; Component Kind: Standard; Component Type: Standard; PP Rotation: 0
footprint SOIC127P600X175-8N
part A pins: 1 1_Out (out), 2 1_IN- (in), 3 1_IN+ (in)
part B pins: 5 2_IN+ (in), 6 2_IN- (in), 7 2_Out (out)
part C pins: 4 V- (power), 8 V+

## LM2904_SOIC8_1
designator U??, comment TLV8542DR
IC OPAMP GP 700KHZ 8SOIC; Part Number: LM2904_SOIC8; Manufacture 1: Texas Instruments; Component Group: Analog IC; PP Material Stack: 0; Footprint: SOIC8; Manufacture Part Number 1: TLV8542DR; Pin Count: 8; Supplier 1: Digi-Key; Supplier Part Number 1: 296-48991-1-ND; Mounting Technology: SMT; RoHS: Yes; Component Kind: Standard; Component Type: Standard; PP Rotation: 0
footprint SOIC127P600X175-8N
part A pins: 1 1_Out (out), 2 1_IN- (in), 3 1_IN+ (in)
part B pins: 5 2_IN+ (in), 6 2_IN- (in), 7 2_Out (out)
part C pins: 4 V- (power), 8 V+

## PCIe x16 Connector Edge (gold finger, x8 mode)
designator J?, comment PCIe Edge Connect Gold Finder
Edge Fingers No Part to Install; MF: NA; MP: PCIE-164-02-X-D-RA; Value: *; Price: NA; Package: PCIeX16-GF-2D-1000-1K-O164
footprint SAMTEC_PCIE-164-02-X-D-RA
footprint PCIeX16-GF-2D-1000-1K-O164 (Golden finger, PCIeX16, Dual, Opposite, Pitch 1mm, 164-Position)
part A pins: A1 A01, A2 A02, A3 A03, A4 A04, A5 A05, A6 A06, A7 A07, A8 A08, A9 A09, A10, A11, A12, A13, A14, A15, A16, A17, A18, A19, A20, A21, A22, A23, A24, A25, A26, A27, A28, A29, A30, A31, A32, A33, A34, A35, A36, A37, A38, A39, A40, A41, B1 B01, B2 B02, B3 B03, B4 B04, B5 B05, B6 B06, B7 B07, B8 B08, B9 B09, B10, B11, B12, B13, B14, B15, B16, B17, B18, B19, B20, B21, B22, B23, B24, B25, B26, B27, B28, B29, B30, B31, B32, B33, B34, B35, B36, B37, B38, B39, B40, B41
part B pins: A42, A43, A44, A45, A46, A47, A48, A49, A50, A51, A52, A53, A54, A55, A56, A57, A58, A59, A60, A61, A62, A63, A64, A65, A66, A67, A68, A69, A70, A71, A72, A73, A74, A75, A76, A77, A78, A79, A80, A81, A82, B42, B43, B44, B45, B46, B47, B48, B49, B50, B51, B52, B53, B54, B55, B56, B57, B58, B59, B60, B61, B62, B63, B64, B65, B66, B67, B68, B69, B70, B71, B72, B73, B74, B75, B76, B77, B78, B79, B80, B81, B82

## RCHIP-1K-0402
designator R?, comment 1k
1k res, 0402, 1%, 1/16W; Part Number: RCHIP-1K-0402; Manufacture 1: Yageo; Manufacture Part Number 1: RC0402FR-071KL; Component Group: Resistor; Case-EIA: 0402; Case-Metric: 1005; Rated Power: 0.063W; Rated Voltage: 75VDC; Footprint: 0402; Pin Count: 2; Supplier 1: Digi-Key; Supplier Part Number 1: 311-1.00KLRCT-ND; Value: 1k; Tolerance: 1%; Mounting Technology: SMT; Temperature Range: -55C to 155C; Component Kind: Standard; Component Type: Standard
footprint RESC1005X40N
pins: 1, 2

## RCHIP-1R0-0402
designator R??, comment 1R0
1R0 res, 0402, 1%, 1/16W; Part Number: RCHIP-1R0-0402; Manufacture 1: Yageo; Manufacture Part Number 1: RC0402FR-071RL; Component Group: Resistor; Case-EIA: 0402; Case-Metric: 1005; Rated Power: 0.063W; Rated Voltage: 75VDC; Footprint: 0402; Pin Count: 2; Supplier 1: Digi-Key; Supplier Part Number 1: 311-1.00LRCT-ND; Value: 1R0; Tolerance: 1%; Mounting Technology: SMT; Temperature Range: -55C to 155C; Component Kind: Standard; Component Type: Standard
footprint RESC1005X40N
pins: 1, 2

## RCHIP-2K7-0402
designator R??, comment 2k7
2k7 res, 0402, 1%, 1/16W; Part Number: RCHIP-2K7-0402; Manufacture 1: Yageo; Manufacture Part Number 1: RC0402FR-072K7L; Component Group: Resistor; Case-EIA: 0402; Case-Metric: 1005; Rated Power: 0.063W; Rated Voltage: 75VDC; Footprint: 0402; Pin Count: 2; Supplier 1: Digi-Key; Supplier Part Number 1: 311-2.70KLRCT-ND; Value: 2k7; Tolerance: 1%; Mounting Technology: SMT; Temperature Range: -55C to 155C; Component Kind: Standard; Component Type: Standard
footprint RESC1005X40N
pins: 1, 2

## RCHIP-10K-0402
designator R?, comment 10k
10k res, 0402, 1%, 1/16W; Part Number: RCHIP-10K-0402; Manufacture 1: Yageo; Manufacture Part Number 1: RC0402FR-0710KL; Component Group: Resistor; Case-EIA: 0402; Case-Metric: 1005; Rated Power: 0.063W; Rated Voltage: 75VDC; Footprint: 0402; Pin Count: 2; Supplier 1: Digi-Key; Supplier Part Number 1: 311-10.0KLRCT-ND; Value: 10k; Tolerance: 1%; Mounting Technology: SMT; Temperature Range: -55C to 155C; Component Kind: Standard; Component Type: Standard
footprint RESC1005X40N
pins: 1, 2

## RCHIP-10R-0402
designator R?, comment 10R
10R res, 0402, 1%, 1/16W; Part Number: RCHIP-10R-0402; Manufacture 1: Yageo; Manufacture Part Number 1: RC0402FR-0710RL; Component Group: Resistor; Case-EIA: 0402; Case-Metric: 1005; Rated Power: 0.063W; Rated Voltage: 75VDC; Footprint: 0402; Pin Count: 2; Supplier 1: Digi-Key; Supplier Part Number 1: 311-10.0LRCT-ND; Value: 10R; Tolerance: 1%; Mounting Technology: SMT; Temperature Range: -55C to 155C; Component Kind: Standard; Component Type: Standard
footprint RESC1005X40N
pins: 1, 2

## RCHIP-220K-0402
designator R??, comment 220k
220k res, 0402, 1%, 1/16W; Part Number: RCHIP-220K-0402; Manufacture 1: Yageo; Manufacture Part Number 1: RC0402FR-07220KL; Component Group: Resistor; Case-EIA: 0402; Case-Metric: 1005; Rated Power: 0.063W; Rated Voltage: 75VDC; Footprint: 0402; Pin Count: 2; Supplier 1: Digi-Key; Supplier Part Number 1: 311-220KLRCT-ND; Value: 220k; Tolerance: 1%; Mounting Technology: SMT; Temperature Range: -55C to 155C; Component Kind: Standard; Component Type: Standard
footprint RESC1005X40N
pins: 1, 2

## RCHIP-680K-0402
designator R??, comment 680k
680k res, 0402, 1%, 1/16W; Part Number: RCHIP-680K-0402; Manufacture 1: Yageo; Manufacture Part Number 1: RC0402FR-07680KL; Component Group: Resistor; Case-EIA: 0402; Case-Metric: 1005; Rated Power: 0.063W; Rated Voltage: 75VDC; Footprint: 0402; Pin Count: 2; Supplier 1: Digi-Key; Supplier Part Number 1: YAG3211CT-ND; Value: 680k; Tolerance: 1%; Mounting Technology: SMT; Temperature Range: -55C to 155C; Component Kind: Standard; Component Type: Standard
footprint RESC1005X40N
pins: 1, 2

## RCHIP-DNM-0402
designator R??, comment DNM
Part Number: RCHIP-DNM-0402; Component Group: Resistor; Case-EIA: 0402; Case-Metric: 1005; Footprint: 0402; Pin Count: 2; Value: DNM; Component Kind: Standard; Component Type: Standard
footprint RESC1005X40N
pins: 1, 2

## REF3012AIDBZT
designator U??
IC VREF SERIES 0.2% SOT23-3; Manufacture 1: Texas Instruments; Output Voltage: 1.25V; Max Input Voltage: 5.5V; Max Output Current: 25mA; Min Input Voltage: 1.8V; Nominal Supply Current: 42uA; Temperature Coefficient: 50ppm/°C; Number of Channels: 1; Quiescent Current: 50uA; Min Output Voltage: 1.248V; Reference Type: Series,Fixed; Component Group: Analog IC; PP Material Stack: 0; Supplier 1: Digi-Key; RoHS: Yes; Category: Voltage References; Stock 1: 7831; Pricing 1: 1=1.18000, 10=1.05300, 25=0.99960, 100=0.76760 (USD); Case/Package: SOT-23; Number of Pins: 3; Min Operating Temperature: -40°C; Max Operating Temperature: 125°C; Packaging: Tape and Reel; Package Quantity: 1; Output Current: 25mA; Max Supply Current: 50uA; Max Output Voltage: 1.25V; Reference Voltage: 1.25V; Termination: SMD/SMT; Length: 2.92mm; Width: 1.3mm; Height: 1mm; Radiation Hardening: No; REACH SVHC: No SVHC; Lead Free: Lead Free; ComponentLink3URL: https://datasheet.ciiva.com/2007/ref3012-2007154.pdf?src-supplier=Digi-Key; ComponentLink3Description: https://datasheet.ciiva.com/2007/ref3012-2007154.pdf?src-supplier=Digi-Key; ComponentLink4URL: https://datasheet.ciiva.com/2007/ref3012-2007155.pdf?src-supplier=Digi-Key; ComponentLink4Description: https://datasheet.ciiva.com/2007/ref3012-2007155.pdf?src-supplier=Digi-Key; ComponentLink5URL: https://datasheet.ciiva.com/3235/ref3033-3235533.pdf?src-supplier=Avnet; ComponentLink5Description: https://datasheet.ciiva.com/3235/ref3033-3235533.pdf?src-supplier=Avnet; ComponentLink6URL: https://datasheet.ciiva.com/3235/ref3033-3235534.pdf?src-supplier=Avnet; ComponentLink6Description: https://datasheet.ciiva.com/3235/ref3033-3235534.pdf?src-supplier=Avnet; .Checked SCH: *; .Checked PCB: *; Supplier Part Number 1: REF3012AIDBZTTR-ND; Manufacturer Part Number: REF3012AIDBZT; Part Number: REF3012AIDBZT; Footprint: SOT23-3; Manufacture Part Number 1: REF3012AIDBZT; Pin Count: 3; Mounting Technology: SMT; Component Kind: Standard; Component Type: Standard; PP Rotation: 0
footprint SOT95P237X112-3N
pins: 1 IN, 2 OUT, 3 GND
text: 1.25 V REF

## S80KS5122GABHM020
designator U?, comment Manufacturer Part Number: S80KS5122GABHM020  (hidden comment: PSRAM 512MBIT HYPERBUS 24FBGA)
IC PSRAM 512MBIT HYPERBUS 24FBGA; Manufacture 1: Infineon Technologies; Operating Supply Voltage: 1.7V~2V; Access Time: 35ns; Address Bus Width: 8b; Max Supply Voltage: 2.5V; Min Supply Voltage: 0V; Memory Type: RAM,SRAM - Asynchronous,SDR; Memory Size: 512Mb; Max Supply Current: 44mA; Number of Ports: 1; Component Group: Digital IC; PP Material Stack: 0; Supplier 1: Digi-Key; RoHS: Yes; Category: RAM; Stock 1: 1798; Pricing 1: 1=6.76000, 10=6.21600, 25=6.08640, 50=6.06560, 135=5.44252, 270=5.27800, 540=5.01900, 1080=4.84400, 5130=4.35750 (USD); Mount: Surface Mount; Case/Package: 24-VBGA; Number of Pins: 24; Min Operating Temperature: -40°C; Max Operating Temperature: 125°C; Package Quantity: 0; Interface: HyperBus; Density: 512Mbit; Packaging: Tray; Length: 8mm; Width: 6mm; Height: 1mm; Radiation Hardening: No; REACH SVHC: No SVHC; Lead Free: Lead Free; ComponentLink3URL: https://www.infineon.com/dgdl/Infineon-S80KS5122_1.8_V_512-Mbit_HyperBus_Interface_HyperRAM_(Self-Refresh_DRAM)-DataSheet-v01_00-EN.pdf?fileId=8ac78c8c7dc4255f017dd81b77c1088f; ComponentLink3Description: https://datasheet.ciiva.com/9274/as6c8008-9274921.pdf?src-supplier=Avnet; ComponentLink4URL: https://www.infineon.com/dgdl/Infineon-S80KS5122_1.8_V_512-Mbit_HyperBus_Interface_HyperRAM_(Self-Refresh_DRAM)-DataSheet-v01_00-EN.pdf?fileId=8ac78c8c7dc4255f017dd81b77c1088f; ComponentLink4Description: https://datasheet.ciiva.com/1510/32786-1510631.pdf?src-supplier=Element14; Supplier Part Number 1: 1450-1039-ND; .Checked SCH: *; .Checked PCB: *; Part Number: S80KS5122GABHM020; Footprint: TSSOP-44; Manufacture Part Number 1: S80KS5122GABHM020; Pin Count: 24; Mounting Technology: SMT; Component Kind: Standard; Component Type: Standard; PP Rotation: 0
footprint BGA_24-TBGA_HYPERRAM
pins: A2 RFU, A3 ~{CS}, A4 ~{RESET}, A5 RFU, B1 ~{CK}, B2 CK, B3 VSS, B4 VCC, B5 RFU, C1 VSSQ, C2 RFU, C3 RWDS, C4 DQ2, C5 RFU, D1 VCCQ, D2 DQ1, D3 DQ0, D4 DQ3, D5 DQ4, E1 DQ7, E2 DQ6, E3 DQ5, E4 VCCQ, E5 VSSQ